# Altium schematic symbol library MP1658GTF-Z.SchLib: 1 symbol
Pins are listed as number, name and electrical type; pins without a type are passive.

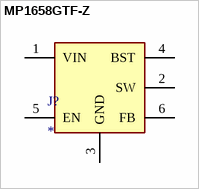
[diagram p0: symbol MP1658GTF-Z]

## MP1658GTF-Z
designator J?
MF: MPS Industries, Inc.; MP: MP1658GTF-Z; SnapEDA_Link: https://www.snapeda.com/parts/MP1658GTF-Z/MPS/view-part/?ref=snap; Package: None; Value: *; Check_prices: https://www.snapeda.com/parts/MP1658GTF-Z/MPS/view-part/?ref=eda
footprint SOTFL50P160X60-6N
pins: 1 VIN, 2 SW, 3 GND, 4 BST, 5 EN, 6 FB